# Altium footprint library amirlib.PcbLib: 456 footprints (part 17 of 29)
Each footprint in its own frame and in the unit in brackets; x right, y up, seen from the top. Pads: shape width x height; smd on the part's side, far side on the other; paste and mask are expansions set on the pad; w line width, h text height; cw(c..) or ccw(c..) is an arc to the next point about the centre after c.
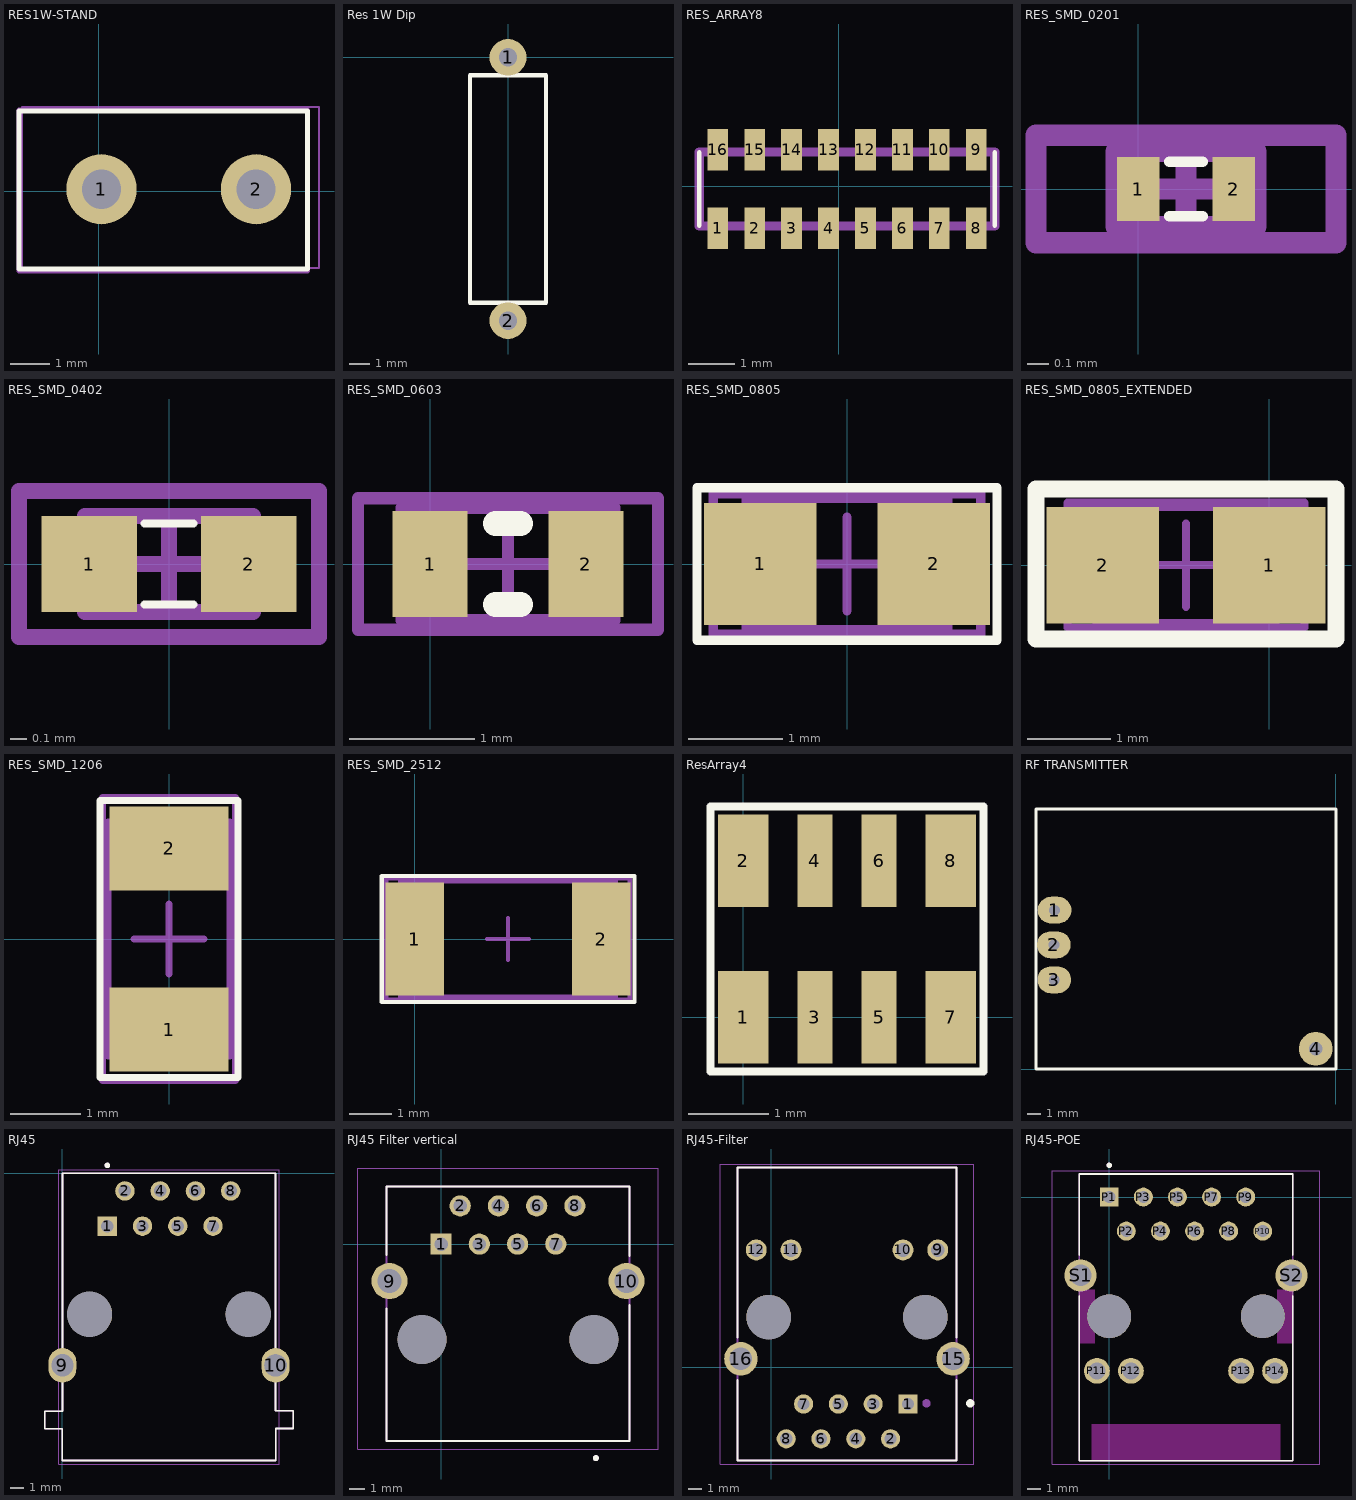
[diagram p16: the footprints below, top view; thin cyan lines are the x and y axes]

## RES1W-STAND [mm]
pads (2):
  round 1.8 hole 1 mask+0.2: 1(0.075,0.05) 2(4.038,0.05)
Top Overlay:
  lines w0.127: -2.037,-1.994 5.35,-1.994 5.35,2.056 -2.037,2.056 -2.037,-1.994
Mechanical 13:
  lines w0.127: -2.037,-2.044 -2.037,2.081 5.35,2.081 5.35,-2.044 -2.037,-2.044
Mechanical 15:
  lines w0.05: -1.963,-1.969 5.65,-1.969 5.65,2.156 -1.963,2.156 -1.963,-0.291 -1.963,-1.969
3D body "User Library-Resistor KNP-100.STEP": height 15.4, standoff -4, extent -1.935,-1.91 4.475,2.11

## Res 1W Dip [mil]
pads (2):
  round 70 hole 35: 1(0,0) 2(0,-500)
Top Overlay:
  lines w7.87: -72,-466 72,-466 72,-34 -72,-34 -72,-466
3D body "Res_Normal (1W).STEP": height 150.74, standoff -78.74, extent -71,-514.5 73,10.5

## RES_ARRAY8 [mm]
pads (16):
  rect 0.45x0.9 smd: 1(-2.616,-0.914) 2(-1.816,-0.914) 3(-1.016,-0.914) 4(-0.216,-0.914) 5(0.584,-0.914) 6(1.384,-0.914) 7(2.184,-0.914) 8(2.984,-0.914) 9(2.984,0.786) 10(2.184,0.786) 11(1.384,0.786) 12(0.584,0.786) 13(-0.216,0.786) 14(-1.016,0.786) 15(-1.816,0.786) 16(-2.616,0.786)
Top Overlay:
  lines w0.1: -3.016,-0.864 -3.016,0.736 ; 3.384,-0.864 3.384,0.736
Mechanical 15:
  lines w0.2: -3.016,-0.864 -3.016,0.736 3.384,0.736 3.384,-0.864 -3.016,-0.864
3D body "742C163104JP.stp": height 0, standoff -0.8, extent -3.022,-1.306 3.378,1.204

## RES_SMD_0201 [mm]
pads (2):
  rect 0.2x0.3 smd: 1(0,0) 2(0.446,0)
Top Overlay:
  lines w0.051: 0.147,-0.127 0.299,-0.127 ; 0.147,0.127 0.299,0.127
Mechanical 13:
  lines w0.1: -0.102,-0.175 -0.102,0.175 0.548,0.175 0.548,-0.175 -0.102,-0.175
Mechanical 15:
  lines w0.1: 0.048,0 0.398,0 ; 0.223,-0.175 0.223,0.175 ; -0.477,-0.25 -0.477,0.25 0.923,0.25 0.923,-0.25 -0.477,-0.25
3D body "0201.STEP": height 0.25, standoff 0, extent -0.031,-0.127 0.477,0.127

## RES_SMD_0402 [mm]
pads (2):
  rect 0.6x0.6 smd: 1(-0.5,0) 2(0.5,0)
Top Overlay:
  lines w0.051: -0.152,-0.254 0.152,-0.254 ; -0.152,0.254 0.152,0.254
Mechanical 13:
  lines w0.1: -0.525,-0.3 0.525,-0.3 0.525,0.3 -0.525,0.3 -0.525,-0.3
Mechanical 15:
  lines w0.1: -0.3,0 0.3,0 ; 0,-0.3 0,0.3 ; -0.94,-0.457 0.94,-0.457 0.94,0.457 -0.94,0.457 -0.94,-0.457
3D body "0402.STEP": height 0.35, standoff 0, extent -0.508,-0.254 0.508,0.254

## RES_SMD_0603 [mm]
pads (2):
  rect 0.6x0.85 smd: 1(0,0) 2(1.244,0)
Top Overlay:
  lines w0.2: 0.522,-0.325 0.722,-0.325 ; 0.522,0.325 0.722,0.325
Mechanical 13:
  lines w0.1: -0.228,-0.45 -0.228,0.45 1.472,0.45 1.472,-0.45 -0.228,-0.45
Mechanical 15:
  lines w0.1: 0.172,0 1.072,0 ; 0.622,-0.45 0.622,0.45 ; -0.578,-0.525 -0.578,0.525 1.822,0.525 1.822,-0.525 -0.578,-0.525
3D body "0603.STEP": height 0.45, standoff 0, extent -0.14,-0.381 1.384,0.381

## RES_SMD_0805 [mm]
pads (2):
  rect 1.2x1.3 smd: 1(-0.925,0) 2(0.925,0)
Top Overlay:
  lines w0.1: -1.6,-0.813 1.6,-0.813 1.6,0.813 -1.6,0.813 -1.6,-0.813
Mechanical 13:
  lines w0.1: -1.075,-0.7 -1.075,0.7 1.075,0.7 1.075,-0.7 -1.075,-0.7
Mechanical 15:
  lines w0.1: -0.5,0 0.5,0 ; 0,-0.5 0,0.5 ; -1.425,-0.75 -1.425,0.75 1.425,0.75 1.425,-0.75 -1.425,-0.75
3D body "0805.STEP": height 0.6, standoff 0, extent -1.016,-0.635 1.016,0.635

## RES_SMD_0805_EXTENDED [mm]
pads (2):
  rect 1.35x1.4 smd: 1(0,0) 2(-2,0)
Top Overlay:
  lines w0.2: -2.803,-0.889 0.803,-0.889 0.803,0.914 -2.803,0.914 -2.803,-0.889
Mechanical 13:
  lines w0.1: -2.075,-0.7 -2.075,0.7 0.075,0.7 0.075,-0.7 -2.075,-0.7
Mechanical 15:
  lines w0.1: -1.5,0 -0.5,0 ; -1,-0.5 -1,0.5 ; -2.425,-0.75 -2.425,0.75 0.425,0.75 0.425,-0.75 -2.425,-0.75
3D body "0805.STEP": height 0.6, standoff 0, extent -2.016,-0.635 0.016,0.635

## RES_SMD_1206 [mm]
pads (2):
  rect 1.7x1.2 smd: 1(0,-1.298) 2(0,1.298)
Top Overlay:
  lines w0.1: -0.991,-1.981 -0.991,1.981 0.991,1.981 0.991,-1.981 -0.991,-1.981
Mechanical 13:
  lines w0.1: -0.875,-1.675 -0.875,1.675 0.875,1.675 0.875,-1.675 -0.875,-1.675
Mechanical 15:
  lines w0.1: -0.5,0 0.5,0 ; 0,-0.5 0,0.5 ; -0.95,-2.025 -0.95,2.025 0.95,2.025 0.95,-2.025 -0.95,-2.025
3D body "1206.STEP": height 0.6, standoff 0, extent -0.762,-1.524 0.762,1.524

## RES_SMD_2512 [mm]
pads (2):
  rect 1.4x2.7 smd: 1(0,0) 2(4.45,0)
Top Overlay:
  lines w0.1: -0.782,-1.499 5.237,-1.499 5.237,1.499 -0.782,1.499 -0.782,-1.499
Mechanical 13:
  lines w0.1: -0.35,-1.375 4.8,-1.375 4.8,1.375 -0.35,1.375 -0.35,-1.375
Mechanical 15:
  lines w0.1: 1.725,0 2.725,0 ; 2.225,-0.5 2.225,0.5 ; -0.675,-1.45 5.125,-1.45 5.125,1.45 -0.675,1.45 -0.675,-1.45
3D body "2010.STEP": height 0.6, standoff 0, extent -0.315,-1.27 4.765,1.27

## ResArray4 [mm]
pads (8):
  rect 0.63x1.15 smd: 1(0,0) 2(0,1.95) 7(2.59,0) 8(2.59,1.95)
  rect 0.44x1.15 smd: 3(0.895,0) 4(0.895,1.95) 5(1.695,0) 6(1.695,1.95)
Top Overlay:
  lines w0.1: -0.405,-0.675 -0.405,2.625 2.995,2.625 2.995,-0.675 -0.405,-0.675
3D body "User Library-RRCAT16.STEP": height 0.52, standoff -0.4, extent -0.321,-0.091 2.9,1.841

## RF TRANSMITTER [mm]
pads (4):
  oval 2.5x2 hole 0.8: 1(-20.828,11.76) 2(-20.879,9.195) 3(-20.853,6.604)
  round 2.5 hole 1: 4(-1.5,1.5)
Top Overlay:
  lines w0.2: -22.2,0 0,0 0,19.253 -22.2,19.253 -22.2,0
3D body "fs1000 v2.step": height 6.35, standoff -1, extent -28.712,0.076 -0.102,19.186

## RJ45 [mm]
pads (12):
  rect 1.398x1.398 hole 0.89: 1(3.235,-3.81)
  round 1.398 hole 0.89: 2(4.505,-1.27) 3(5.775,-3.81) 4(7.045,-1.27) 5(8.315,-3.81) 6(9.585,-1.27) 7(10.855,-3.81) 8(12.125,-1.27)
  oval 2x2.5 hole 1.6: 9(0,-13.84)
  oval 2x2.5 hole 1.6 unplated: 10(15.36,-13.84)
  round 3.25 hole 3.25 unplated: ""(1.965,-10.16) ""(13.395,-10.16)
Top Overlay:
  circle w0.2: c3.235,0.57 r0.1
  lines w0.127: -0.004,-20.697 -0.004,-18.415 -1.274,-18.415 -1.274,-17.145 -0.004,-17.145 ; -0.001,-20.7 0.253,-20.7 14.936,-20.7 15.366,-20.7 ; 0,-17.145 0,-3.63 0,-2.36 0,0 15.36,0 15.36,-2.36 15.36,-3.63 15.36,-17.12 ; 15.367,-20.699 15.367,-18.39 16.637,-18.39 16.637,-17.12 15.367,-17.12
Mechanical 13:
  circle w0.2: c3.235,0.57 r0.1
  lines w0.127: -0.004,-20.697 -0.004,-18.415 -1.27,-18.415 -1.27,-17.145 -0.025,-17.145 0,-17.12 0,-3.63 0,-2.36 0,0 15.36,0 15.36,-2.36 15.36,-3.63 15.36,-17.12 16.637,-17.12 16.637,-18.39 15.367,-18.39 15.367,-20.701 ; -0.001,-20.7 0.507,-20.7 15.165,-20.7 15.366,-20.7
Mechanical 15:
  lines w0.05: -0.25,-20.95 -0.25,-3.88 -0.25,-2.11 -0.25,0.25 15.61,0.25 15.61,-2.11 15.61,-3.88 15.61,-20.95 -0.25,-20.95
3D body "RJ45_SS_6488_FLS_Stewart.step": height 12.85, standoff -3.56, extent -1.245,-20.676 16.535,0.025

## RJ45 Filter vertical [mm]
pads (12):
  rect 1.408x1.408 hole 0.9 paste-2539.97 mask+0.05: 1(0,0)
  round 1.408 hole 0.9 paste-2539.97 mask+0.05: 2(1.27,2.54) 3(2.54,0) 4(3.81,2.54) 5(5.08,0) 6(6.35,2.54) 7(7.62,0) 8(8.89,2.54)
  round 2.4 hole 1.6 paste-2539.97 mask+0.05: 9(-3.43,-2.46) 10(12.32,-2.46)
  round 3.25 hole 3.25 unplated: ""(-1.27,-6.35) ""(10.16,-6.35)
Top Overlay:
  circle w0.2: c10.285,-14.228 r0.1
  lines w0.127: -3.632,-4.293 -3.632,-13.081 12.518,-13.081 12.518,-4.039 ; -3.632,-0.737 -3.632,3.819 12.518,3.819 12.518,-0.813
Mechanical 6:
  circle w0.2: c10.287,-14.224 r0.1
  lines w0.127: -3.63,-13.077 12.52,-13.077 12.52,3.823 -3.63,3.823 -3.63,-13.077
Mechanical 7:
  lines w0.05: -5.525,-13.642 14.415,-13.642 14.415,5.031 -5.525,5.031 -5.525,-13.642

## RJ45-Filter [mm]
pads (16):
  rect 1.398x1.398 hole 0.89: 1(9.985,-2.665)
  round 1.398 hole 0.89: 2(8.715,-5.205) 3(7.445,-2.665) 4(6.175,-5.205) 5(4.905,-2.665) 6(3.635,-5.205) 7(2.365,-2.665) 8(1.095,-5.205)
  round 1.53 hole 1.02: 9(12.16,8.585) 10(9.62,8.585) 11(1.45,8.585) 12(-1.09,8.585)
  round 2.445 hole 1.63: 15(13.28,0.635) 16(-2.21,0.635)
  round 3.25 hole 3.25 unplated: ""(-0.18,3.685) ""(11.25,3.685)
Top Overlay:
  circle w0.3: c14.535,-2.615 r0.15
  lines w0.127: -2.465,-0.915 -2.465,-6.795 13.535,-6.795 13.535,-0.915 ; -2.465,2.185 -2.465,14.605 13.535,14.605 13.535,2.185
Mechanical 13:
  circle w0.3: c11.335,-2.615 r0.15
  lines w0.127: -2.465,-6.795 -2.465,14.605 13.535,14.605 13.535,-6.795 -2.465,-6.795
Mechanical 15:
  lines w0.05: -3.715,-7.045 -3.715,14.855 14.785,14.855 14.785,-7.045 -3.715,-7.045
3D body "step_temp.STEP": height 13.5, standoff -3.05, extent -2.504,-6.729 13.536,14.571

## RJ45-POE [mm]
pads (18):
  rect 1.408x1.408 hole 0.9 mask+0.05: P1(0,0)
  round 1.408 hole 0.9 mask+0.05: P2(1.27,-2.54) P3(2.54,0) P4(3.81,-2.54) P5(5.08,0) P6(6.35,-2.54) P7(7.62,0) P8(8.89,-2.54) P9(10.16,0) P10(11.43,-2.54)
  round 1.92 hole 1.28 mask+0.05: P11(-0.925,-12.95) P12(1.615,-12.95) P13(9.815,-12.95) P14(12.355,-12.95)
  round 2.4 hole 1.6 mask+0.05: S1(-2.14,-5.84) S2(13.57,-5.84)
  round 3.25 hole 3.25 unplated: ""(0,-8.89) ""(11.43,-8.89)
Top Overlay:
  circle w0.2: c0,2.36 r0.1
  lines w0.127: -2.235,-7.36 -2.235,-19.64 13.665,-19.64 13.665,-7.36 ; -2.235,-4.32 -2.235,1.71 13.665,1.71 13.665,-4.32
Keep-Out Layer:
  board cut-out: -1.29,-16.94 -1.29,-19.64 12.72,-19.64 12.72,-16.94
  board cut-out: 12.5,-10.89 12.5,-10.113 12.583,-10.03 12.689,-9.913 12.865,-9.65 12.986,-9.358 13.047,-9.048 13.055,-8.89 13.046,-8.717 12.972,-8.38 12.829,-8.066 12.622,-7.79 12.497,-7.67 12.5,-7.667 12.5,-6.89 13.665,-6.89 13.665,-10.89
  board cut-out: -1.07,-10.89 -1.07,-10.113 -1.153,-10.03 -1.259,-9.913 -1.435,-9.65 -1.556,-9.358 -1.617,-9.048 -1.625,-8.89 -1.616,-8.717 -1.542,-8.38 -1.399,-8.066 -1.192,-7.79 -1.067,-7.67 -1.07,-7.667 -1.07,-6.89 -2.235,-6.89 -2.235,-10.89
Mechanical 13:
  circle w0.2: c0,2.36 r0.1
  lines w0.127: -2.235,-19.64 -2.235,1.71 13.665,1.71 13.665,-19.64 -2.235,-19.64
Mechanical 15:
  lines w0.05: -4.255,-19.89 15.685,-19.89 15.685,1.96 -4.255,1.96 -4.255,-19.89
3D body "6-2301994-0--3DModel-STEP-56544.STEP": height 15.75, standoff -3.55, extent -4.285,-19.64 15.715,1.71